# Altium schematic symbol library PTS120630V012.SchLib: 1 symbol
Pins are listed as number, name and electrical type; pins without a type are passive.

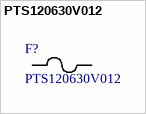
[diagram p0: symbol PTS120630V012]

## PTS120630V012
designator F?
No Description Available; Manufacturer_Name: Eaton; Copyright: Copyright (C) 2026 Ultra Librarian. All rights reserved.; Manufacturer_Part_Number: PTS120630V012
footprint FUSE_PTS1206_EAT
pins: 1, 2